# Altium footprint library Connectors.PcbLib: 120 footprints (part 8 of 8)
Each footprint in its own frame and in the unit in brackets; x right, y up, seen from the top. Pads: shape width x height; smd on the part's side, far side on the other; paste and mask are expansions set on the pad; w line width, h text height; cw(c..) or ccw(c..) is an arc to the next point about the centre after c.
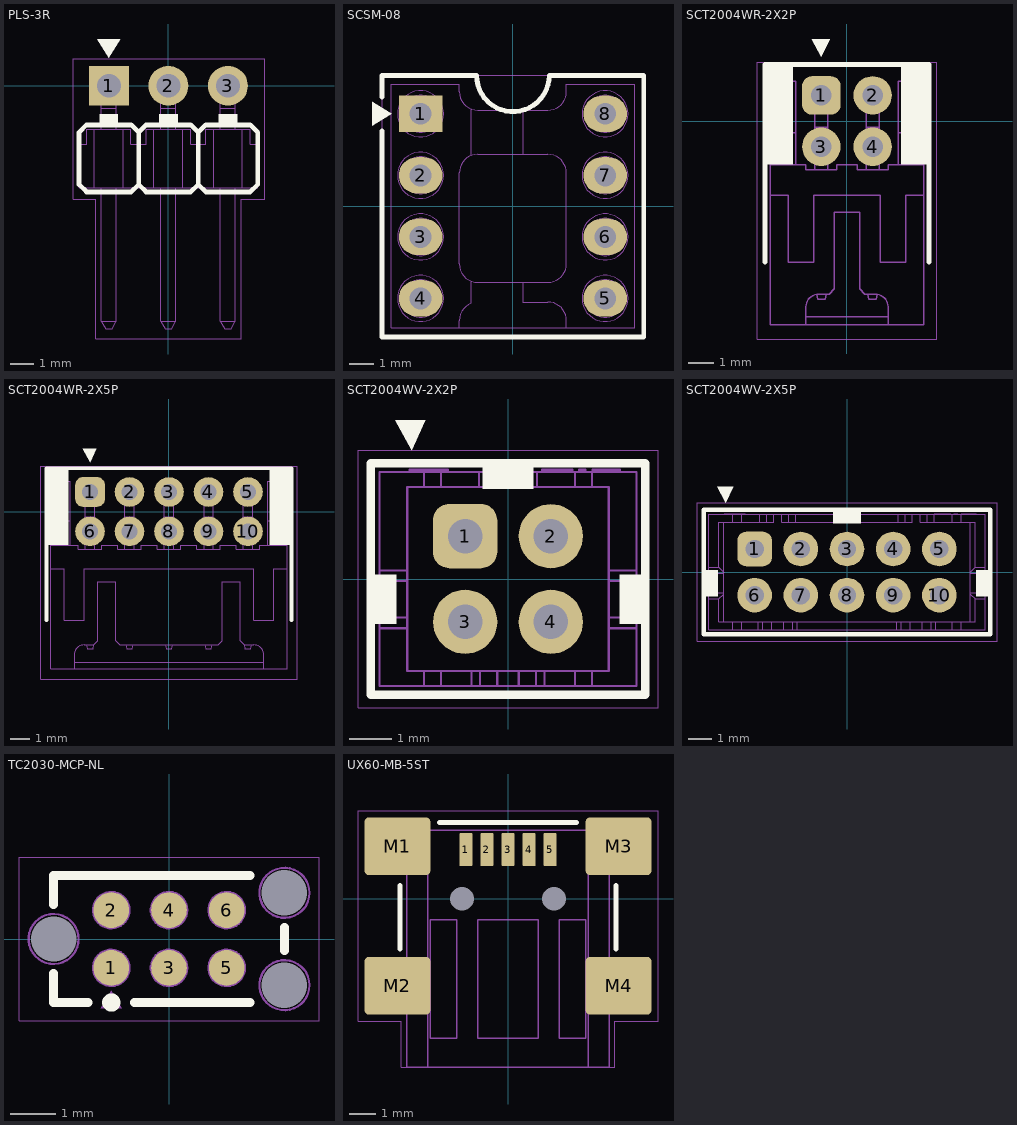
[diagram p7: the footprints below, top view; thin cyan lines are the x and y axes]

## PLS-3R [mm]
pads (3):
  rect 1.7x1.7 hole 1.02: 1(-2.54,0)
  round 1.7 hole 1.02: 2(0,0) 3(2.54,0)
Top Overlay:
  rectangle: 2.14,-1.7 2.94,-1.2
  rectangle: -0.4,-1.7 0.4,-1.2
  rectangle: -2.94,-1.7 -2.14,-1.2
  region: -2.54,1.2 -2.044,1.994 -3.036,1.994
  lines w0.2: -1.27,-4.211 -1.27,-1.989 ; -1.27,-4.211 -0.952,-4.529 0.953,-4.529 1.27,-4.211 ; -1.27,-4.211 -1.587,-4.529 -3.492,-4.529 -3.81,-4.211 -3.81,-1.989 -3.492,-1.671 -1.587,-1.671 -1.27,-1.989 ; -1.27,-1.989 -0.953,-1.671 0.953,-1.671 1.27,-1.989 ; 1.27,-4.211 1.588,-4.529 3.493,-4.529 3.81,-4.211 3.81,-1.989 3.492,-1.671 1.587,-1.671 1.27,-1.989 ; 1.27,-4.211 1.27,-1.989
Top Courtyard:
  lines w0.025: -4.05,-4.85 -4.05,1.15 4.1,1.15 4.1,-4.85 3.1,-4.85 3.1,-10.8 -3.1,-10.8 -3.1,-4.85 -4.05,-4.85
Top Assembly:
  lines w0.05: -2.86,-4.36 -2.86,-10.042 ; -2.86,-1.86 -2.86,-0.96 ; -2.22,-4.36 -2.22,-10.042 ; -2.22,-1.86 -2.22,-0.96 ; -0.32,-4.36 -0.32,-10.042 ; -0.32,-1.86 -0.32,-0.96 ; 0.32,-4.36 0.32,-10.042 ; 0.32,-1.86 0.32,-0.96 ; 2.22,-4.36 2.22,-10.042 ; 2.22,-1.86 2.22,-0.96 ; 2.86,-4.36 2.86,-10.042 ; 2.86,-1.86 2.86,-0.96 ; -3.155,-4.36 -3.81,-4.36 -3.81,-2.5 -3.482,-2.5 -3.482,-1.86 -3.155,-1.86 ; -3.155,-4.36 -1.925,-4.36 ; -3.155,-4.36 -3.155,-1.86 ; -3.155,-1.86 -1.925,-1.86 ; -2.86,-10.042 -2.677,-10.36 -2.403,-10.36 -2.22,-10.042 ; -2.86,-10.042 -2.22,-10.042 ; -2.86,-0.96 -2.22,-0.96 ; -2.86,-0.96 -2.86,0 -2.22,0 -2.22,-0.96 ; -1.925,-4.36 -1.27,-4.36 ; -1.925,-4.36 -1.925,-1.86 ; -1.925,-1.86 -1.597,-1.86 -1.597,-2.5 -1.27,-2.5 -1.27,-4.36 ; -1.27,-4.36 -0.615,-4.36 ; -1.27,-4.36 -1.27,-2.5 -0.943,-2.5 -0.943,-1.86 -0.615,-1.86 ; -0.615,-4.36 0.615,-4.36 ; -0.615,-4.36 -0.615,-1.86 ; -0.615,-1.86 0.615,-1.86 ; -0.32,-10.042 -0.137,-10.36 0.137,-10.36 0.32,-10.042 ; -0.32,-10.042 0.32,-10.042 ; -0.32,-0.96 0.32,-0.96 ; -0.32,-0.96 -0.32,0 0.32,0 0.32,-0.96 ; 0.615,-4.36 1.27,-4.36 ; 0.615,-4.36 0.615,-1.86 ; 0.615,-1.86 0.943,-1.86 0.943,-2.5 1.27,-2.5 ; 1.27,-4.36 1.925,-4.36 ; 1.27,-4.36 1.27,-2.5 ; 1.27,-4.36 1.27,-2.5 ; 1.27,-2.5 1.597,-2.5 1.597,-1.86 1.925,-1.86 ; 1.925,-4.36 3.155,-4.36 ; 1.925,-4.36 1.925,-1.86 ; 1.925,-1.86 3.155,-1.86 ; 2.22,-10.042 2.403,-10.36 2.677,-10.36 2.86,-10.042 ; 2.22,-10.042 2.86,-10.042 ; 2.22,-0.96 2.86,-0.96 ; 2.22,-0.96 2.22,0 2.86,0 2.86,-0.96 ; 3.155,-4.36 3.81,-4.36 3.81,-2.5 3.483,-2.5 3.483,-1.86 3.155,-1.86 ; 3.155,-4.36 3.155,-1.86
  text ".Designator" at -4.511,1.047 h2
3D body "Pin Header 1x3 TH Angle Pitch 2.54mm.stp": height 3.09, standoff -3.2, extent -3.805,-10.796 3.82,0.316

## SCSM-08 [mm] "DIP-8 Panel"
pads (8):
  rect 1.8x1.5 hole 0.9: 1(-3.81,3.81)
  oval 1.8x1.5 hole 0.9: 2(-3.81,1.27) 3(-3.81,-1.27) 4(-3.81,-3.81) 5(3.81,-3.81) 6(3.81,-1.27) 7(3.81,1.27) 8(3.81,3.81)
Top Overlay:
  region: -5.01,3.81 -5.804,4.306 -5.804,3.314
  lines w0.2: -5.4,3.1 -5.4,-5.4 5.4,-5.4 5.4,5.4 1.5,5.4 cw(c0,5.4) -1.5,5.4 -5.4,5.4 -5.4,4.5
Top Courtyard:
  lines w0.025: -5.4,-5.4 -5.4,5.4 5.4,5.4 5.4,-5.4 -5.4,-5.4
Top Assembly:
  lines w0.05: -4.582,-1.27 -4.362,-1.27 ; -3.038,3.81 -3.258,3.81 ; -2.21,-5.029 -2.21,-4.724 cw(c-1.448,-4.724) -1.727,-4.015 -1.727,-3.097 ; -1.727,2.081 -1.727,4.015 ; 0.406,-3.15 0.406,-3.962 1.448,-3.962 cw(c1.448,-4.724) 2.21,-4.724 2.21,-5.029 ; 0.406,2.134 0.406,3.962 ; 3.038,-1.27 3.258,-1.27 ; -4.582,-3.81 ccw(c-3.81,-3.81) -3.038,-3.81 ; -4.582,-3.81 cw(c-3.81,-3.81) -3.038,-3.81 ; -4.582,-3.81 -4.362,-3.81 ; -4.582,1.27 ccw(c-3.81,1.27) -3.038,1.27 ; -4.582,1.27 cw(c-3.81,1.27) -3.038,1.27 ; -4.582,1.27 -4.362,1.27 ; -4.582,3.81 ccw(c-3.81,3.81) -3.038,3.81 ccw(c-3.81,3.81) -4.582,3.81 ; -4.582,3.81 -4.362,3.81 ; -4.362,-3.81 cw(c-3.81,-3.81) -3.258,-3.81 ; -4.362,-3.81 ccw(c-3.81,-3.81) -3.258,-3.81 ; -4.362,-1.27 cw(c-3.81,-1.27) -3.258,-1.27 ; -4.362,-1.27 ccw(c-3.81,-1.27) -3.258,-1.27 ; -4.362,1.27 ccw(c-3.81,1.27) -3.258,1.27 ; -4.362,1.27 cw(c-3.81,1.27) -3.258,1.27 ; -4.362,3.81 ccw(c-3.81,3.81) -3.258,3.81 ; -4.362,3.81 cw(c-3.81,3.81) -3.258,3.81 ; -3.258,-3.81 -3.038,-3.81 ; -3.258,-1.27 -3.038,-1.27 ; -3.258,1.27 -3.038,1.27 ; -3.038,-1.27 ccw(c-3.81,-1.27) -4.582,-1.27 ccw(c-3.81,-1.27) -3.038,-1.27 ; 3.038,-3.81 ccw(c3.81,-3.81) 4.582,-3.81 ; 3.038,-3.81 cw(c3.81,-3.81) 4.582,-3.81 ; 3.038,-3.81 3.258,-3.81 ; 3.038,1.27 ccw(c3.81,1.27) 4.582,1.27 ; 3.038,1.27 cw(c3.81,1.27) 4.582,1.27 ; 3.038,1.27 3.258,1.27 ; 3.038,3.81 cw(c3.81,3.81) 4.582,3.81 ; 3.038,3.81 ccw(c3.81,3.81) 4.582,3.81 ; 3.038,3.81 3.258,3.81 ; 3.258,-3.81 ccw(c3.81,-3.81) 4.362,-3.81 ; 3.258,-3.81 cw(c3.81,-3.81) 4.362,-3.81 ; 3.258,-1.27 cw(c3.81,-1.27) 4.362,-1.27 ; 3.258,-1.27 ccw(c3.81,-1.27) 4.362,-1.27 ; 3.258,1.27 ccw(c3.81,1.27) 4.362,1.27 ; 3.258,1.27 cw(c3.81,1.27) 4.362,1.27 ; 3.258,3.81 cw(c3.81,3.81) 4.362,3.81 ; 3.258,3.81 ccw(c3.81,3.81) 4.362,3.81 ; 4.362,-3.81 4.582,-3.81 ; 4.362,-1.27 4.582,-1.27 ; 4.362,1.27 4.582,1.27 ; 4.362,3.81 4.582,3.81 ; 4.582,-1.27 ccw(c3.81,-1.27) 3.038,-1.27 ccw(c3.81,-1.27) 4.582,-1.27 ; -5.029,-5.029 -5.029,5.029 -2.21,5.029 -2.21,4.724 ccw(c-1.448,4.724) -1.448,3.962 1.448,3.962 ccw(c1.448,4.724) 2.21,4.724 2.21,5.029 5.029,5.029 5.029,-5.029 -5.029,-5.029 ; -4.763,-3.81 ccw(c-3.81,-3.81) -2.857,-3.81 ccw(c-3.81,-3.81) -4.763,-3.81 ; -4.763,-1.27 ccw(c-3.81,-1.27) -2.857,-1.27 ccw(c-3.81,-1.27) -4.763,-1.27 ; -4.763,1.27 ccw(c-3.81,1.27) -2.857,1.27 ccw(c-3.81,1.27) -4.763,1.27 ; -4.763,3.81 ccw(c-3.81,3.81) -2.857,3.81 ccw(c-3.81,3.81) -4.763,3.81 ; -2.21,-2.388 ccw(c-1.448,-2.388) -1.448,-3.15 1.448,-3.15 ccw(c1.448,-2.388) 2.21,-2.388 2.21,1.372 ccw(c1.448,1.372) 1.448,2.134 -1.448,2.134 ccw(c-1.448,1.372) -2.21,1.372 -2.21,-2.388 ; 2.857,-3.81 ccw(c3.81,-3.81) 4.763,-3.81 ccw(c3.81,-3.81) 2.857,-3.81 ; 2.858,-1.27 ccw(c3.81,-1.27) 4.763,-1.27 ccw(c3.81,-1.27) 2.858,-1.27 ; 2.857,1.27 ccw(c3.81,1.27) 4.763,1.27 ccw(c3.81,1.27) 2.857,1.27 ; 2.857,3.81 ccw(c3.81,3.81) 4.763,3.81 ccw(c3.81,3.81) 2.857,3.81
  text ".Designator" at -6.763,-0.679 h3
3D body "SCSM-8.x_t": height 4.5, standoff -2.87, extent -5.029,-5.029 5.029,5.029

## SCT2004WR-2X2P [mm]
height 6.5
pads (4):
  rrect50% 1.5x1.5 hole 0.8 mask+0.05: 1(-1,1)
  round 1.5 hole 0.8 mask+0.05: 2(1,1) 3(-1,-1) 4(1,-1)
Top Overlay:
  region: -2.1,-1.7 -2.1,2.2 -3.2,2.2 -3.2,-1.7
  region: 3.2,-1.7 3.2,2.2 2.1,2.2 2.1,-1.7
  region: -1,2.5 -1.382,3.2 -0.682,3.2
  lines w0.2: -3.2,-5.5 -3.2,2.2 3.2,2.2 3.2,-5.5
Top Courtyard:
  lines w0.025: -3.5,-8.5 3.5,-8.5 3.5,2.3 -3.5,2.3 -3.5,-8.5
Top Assembly:
  lines w0.05: -3,-2.9 -2.3,-2.9 -2.3,-5.5 -1.3,-5.5 -1.3,-2.9 1.3,-2.9 1.3,-5.5 2.3,-5.5 2.3,-2.9 3,-2.9 ; -3,-1.7 -1.6,-1.7 -1.6,-1.9 -0.4,-1.9 -0.4,-1.7 0.4,-1.7 0.4,-1.9 1.6,-1.9 1.6,-1.7 3,-1.7 ; -3,-0.45 -2,-0.45 ; -2,-1.7 -2,1.55 -3,1.55 -3,-7.95 3,-7.95 3,1.55 2,1.55 2,-1.7 ; -1.6,-7.95 -1.6,-7.25 cw(c-1.1,-7.25) -1.1,-6.75 -0.7,-6.75 -0.5,-6.55 -0.5,-3.55 0.5,-3.55 0.5,-6.55 0.7,-6.75 1.1,-6.75 cw(c1.1,-7.25) 1.6,-7.25 1.6,-7.95 ; -1.6,-7.625 1.6,-7.625 ; -1.25,-1.9 -1.25,1.25 -0.75,1.25 -0.75,-1.9 ; -1.25,-0.25 -0.75,-0.25 ; -1.188,-6.758 -1.15,-6.95 -0.85,-6.95 -0.81,-6.75 ; 0.75,-1.9 0.75,1.25 1.25,1.25 1.25,-1.9 ; 0.75,-0.25 1.25,-0.25 ; 0.81,-6.75 0.85,-6.95 1.15,-6.95 1.188,-6.758 ; 2,-0.45 3,-0.45
  text ".Designator" at 5.679,-9.663 h3
3D body "SCT2004WR-2X2P.x_t": height 5.55, standoff -2.95, extent -3,-7.95 3,1.55

## SCT2004WR-2X5P [mm]
height 6.5
pads (10):
  rrect50% 1.5x1.5 hole 0.8 mask+0.05: 1(-4,1)
  round 1.5 hole 0.8 mask+0.05: 2(-2,1) 3(0,1) 4(2,1) 5(4,1) 6(-4,-1) 7(-2,-1) 8(0,-1) 9(2,-1) 10(4,-1)
Top Overlay:
  region: 6.2,-1.7 6.2,2.2 5.1,2.2 5.1,-1.7
  region: -5.1,-1.7 -5.1,2.2 -6.2,2.2 -6.2,-1.7
  region: -4,2.5 -4.382,3.2 -3.682,3.2
  lines w0.2: -6.2,-5.5 -6.2,2.2 6.2,2.2 6.2,-5.5
Top Courtyard:
  lines w0.025: -6.5,-8.5 -6.5,2.3 6.5,2.3 6.5,-8.5 -6.5,-8.5
Top Assembly:
  lines w0.05: -6,-2.9 -5.3,-2.9 -5.3,-5.5 -4.3,-5.5 -4.3,-2.9 4.3,-2.9 4.3,-5.5 5.3,-5.5 5.3,-2.9 6,-2.9 ; -6,-1.7 -4.6,-1.7 -4.6,-1.9 -3.4,-1.9 -3.4,-1.7 -2.6,-1.7 -2.6,-1.9 -1.4,-1.9 -1.4,-1.7 -0.6,-1.7 -0.6,-1.9 0.6,-1.9 0.6,-1.7 1.4,-1.7 1.4,-1.9 2.6,-1.9 2.6,-1.7 3.4,-1.7 3.4,-1.9 4.6,-1.9 4.6,-1.7 6,-1.7 ; -6,-0.45 -5,-0.45 ; -5,-1.7 -5,1.55 -6,1.55 -6,-7.95 6,-7.95 6,1.55 5,1.55 5,-1.7 ; -4.8,-7.95 -4.8,-7.25 cw(c-4.3,-7.25) -4.3,-6.75 -3.8,-6.75 -3.6,-6.55 -3.6,-3.55 -2.7,-3.55 -2.7,-6.55 -2.5,-6.75 2.5,-6.75 2.7,-6.55 2.7,-3.55 3.6,-3.55 3.6,-6.55 3.8,-6.75 4.3,-6.75 cw(c4.3,-7.25) 4.8,-7.25 4.8,-7.95 ; -4.8,-7.625 4.8,-7.625 ; -4.25,-1.9 -4.25,1.25 -3.75,1.25 -3.75,-1.9 ; -4.25,-0.25 -3.75,-0.25 ; -4.19,-6.75 -4.15,-6.95 -3.85,-6.95 -3.81,-6.75 ; -2.25,-1.9 -2.25,1.25 -1.75,1.25 -1.75,-1.9 ; -2.25,-0.25 -1.75,-0.25 ; -2.19,-6.75 -2.15,-6.95 -1.85,-6.95 -1.81,-6.75 ; -0.25,-1.9 -0.25,1.25 0.25,1.25 0.25,-1.9 ; -0.25,-0.25 0.25,-0.25 ; -0.19,-6.75 -0.15,-6.95 0.15,-6.95 0.19,-6.75 ; 1.75,-1.9 1.75,1.25 2.25,1.25 2.25,-1.9 ; 1.75,-0.25 2.25,-0.25 ; 1.81,-6.75 1.85,-6.95 2.15,-6.95 2.19,-6.75 ; 3.75,-1.9 3.75,1.25 4.25,1.25 4.25,-1.9 ; 3.75,-0.25 4.25,-0.25 ; 3.81,-6.75 3.85,-6.95 4.15,-6.95 4.19,-6.75 ; 5,-0.45 6,-0.45
  text ".Designator" at -6.763,-5.179 h3
3D body "SCT2004WR-2X5P.x_t": height 5.55, standoff -2.95, extent -6,-7.95 6,1.55

## SCT2004WV-2X2P [mm]
height 6.5
pads (4):
  rrect50% 1.5x1.5 hole 0.8 mask+0.05: 1(-1,1)
  round 1.5 hole 0.8 mask+0.05: 2(1,1) 3(-1,-1) 4(1,-1)
Top Overlay:
  region: 3.2,-1.05 3.2,0.1 2.6,0.1 2.6,-1.05
  region: -2.6,-1.05 -2.6,0.1 -3.2,0.1 -3.2,-1.05
  rectangle: -0.6,2.1 0.6,2.7
  region: -2.25,3 -2.632,3.7 -1.932,3.7
  lines w0.2: -3.2,-2.7 -3.2,2.7 3.2,2.7 3.2,-2.7 -3.2,-2.7
Top Courtyard:
  lines w0.025: -3.5,-3 -3.5,3 3.5,3 3.5,-3 -3.5,-3
Top Assembly:
  lines w0.05: -3,-1.15 -2.35,-1.15 ; -3,-0.9 -2.35,-0.9 ; -3,-0.05 -2.35,-0.05 ; -3,0.2 -2.35,0.2 ; -2.3,2.5 -2.3,2.55 -1.4,2.55 -1.4,2.5 ; -1.96,-2.5 -1.96,-2.15 ; -1.96,2.15 -1.96,2.5 ; -1.56,-2.5 -1.56,-2.15 ; -1.56,2.15 -1.56,2.5 ; -0.85,-2.5 -0.85,-2.15 ; -0.675,2.15 -0.675,2.5 ; -0.65,-2.5 -0.65,-2.15 ; -0.475,2.15 -0.475,2.5 ; -0.25,-2.5 -0.25,-2.15 ; -0.175,2.5 -0.175,2.15 -2.35,2.15 -2.35,-2.15 2.35,-2.15 2.35,2.15 0.175,2.15 0.175,2.5 ; 0.25,-2.5 0.25,-2.15 ; 0.475,2.15 0.475,2.5 ; 0.65,-2.5 0.65,-2.15 ; 0.675,2.15 0.675,2.5 ; 0.794,2.5 0.794,2.55 0.851,2.55 ; 0.85,-2.5 0.85,-2.15 ; 0.855,2.5 0.855,2.55 1.166,2.55 ; 1.166,2.5 1.166,2.55 ; 1.502,2.5 1.502,2.55 1.166,2.55 ; 1.56,-2.5 1.56,-2.15 ; 1.56,2.15 1.56,2.5 ; 1.655,2.5 1.655,2.55 1.809,2.55 1.809,2.5 ; 1.96,-2.5 1.96,-2.15 ; 1.96,2.15 1.96,2.5 ; 1.973,2.5 1.973,2.55 2.609,2.55 2.609,2.5 ; 2.127,2.5 2.127,2.55 ; 2.35,-1.15 3,-1.15 ; 2.35,-0.9 3,-0.9 ; 2.35,-0.05 3,-0.05 ; 2.35,0.2 3,0.2 ; 2.455,2.5 2.455,2.55 ; -1.3,-1.3 -0.7,-1.3 ; -1.3,-1.3 -1.3,-0.7 ; -1.3,-1.3 -1.15,-1.15 ; -1.3,-0.7 -0.7,-0.7 ; -1.3,-0.7 -1.15,-0.85 ; -1.3,0.7 -0.7,0.7 ; -1.3,0.7 -1.3,1.3 ; -1.3,0.7 -1.15,0.85 ; -1.3,1.3 -0.7,1.3 ; -1.3,1.3 -1.15,1.15 ; -1.15,-1.15 -0.85,-1.15 ; -1.15,-1.15 -1.15,-0.85 ; -1.15,-0.85 -0.85,-0.85 ; -1.15,0.85 -0.85,0.85 ; -1.15,0.85 -1.15,1.15 ; -1.15,1.15 -0.85,1.15 ; -0.85,-1.15 -0.7,-1.3 ; -0.85,-1.15 -0.85,-0.85 ; -0.85,-0.85 -0.7,-0.7 ; -0.85,0.85 -0.7,0.7 ; -0.85,0.85 -0.85,1.15 ; -0.85,1.15 -0.7,1.3 ; -0.7,-1.3 -0.7,-0.7 ; -0.7,0.7 -0.7,1.3 ; 0.7,-1.3 1.3,-1.3 ; 0.7,-1.3 0.7,-0.7 ; 0.7,-1.3 0.85,-1.15 ; 0.7,-0.7 1.3,-0.7 ; 0.7,-0.7 0.85,-0.85 ; 0.7,0.7 1.3,0.7 ; 0.7,0.7 0.7,1.3 ; 0.7,0.7 0.85,0.85 ; 0.7,1.3 1.3,1.3 ; 0.7,1.3 0.85,1.15 ; 0.85,-1.15 0.85,-0.85 ; 0.85,-1.15 1.15,-1.15 ; 0.85,-0.85 1.15,-0.85 ; 0.85,0.85 1.15,0.85 ; 0.85,0.85 0.85,1.15 ; 0.85,1.15 1.15,1.15 ; 1.15,-1.15 1.3,-1.3 ; 1.15,-1.15 1.15,-0.85 ; 1.15,-0.85 1.3,-0.7 ; 1.15,0.85 1.3,0.7 ; 1.15,0.85 1.15,1.15 ; 1.15,1.15 1.3,1.3 ; 1.3,-1.3 1.3,-0.7 ; 1.3,0.7 1.3,1.3 ; -3,-2.5 3,-2.5 3,2.5 -3,2.5 -3,-2.5 ; -1.25,-1.25 -0.75,-1.25 -0.75,-0.75 -1.25,-0.75 -1.25,-1.25 ; -1.25,0.75 -0.75,0.75 -0.75,1.25 -1.25,1.25 -1.25,0.75 ; 0.75,-1.25 1.25,-1.25 1.25,-0.75 0.75,-0.75 0.75,-1.25 ; 0.75,0.75 1.25,0.75 1.25,1.25 0.75,1.25 0.75,0.75
  text ".Designator" at -6.763,3.321 h3
3D body "SCT2004WV-2X2P.x_t": height 6.55, standoff -2.95, extent -3,-2.5 3,2.52

## SCT2004WV-2X5P [mm]
height 6.5
pads (10):
  rrect50% 1.5x1.5 hole 0.8 mask+0.05: 1(-4,1)
  round 1.5 hole 0.8 mask+0.05: 2(-2,1) 3(0,1) 4(2,1) 5(4,1) 6(-4,-1) 7(-2,-1) 8(0,-1) 9(2,-1) 10(4,-1)
Top Overlay:
  rectangle: -0.6,2.1 0.6,2.7
  region: -5.6,-1.05 -5.6,0.1 -6.2,0.1 -6.2,-1.05
  region: 6.2,-1.05 6.2,0.1 5.6,0.1 5.6,-1.05
  region: -5.25,3 -5.632,3.7 -4.932,3.7
  lines w0.2: -6.2,-2.7 6.2,-2.7 6.2,2.7 -6.2,2.7 -6.2,-2.7
Top Courtyard:
  lines w0.025: -6.5,-3 6.5,-3 6.5,3 -6.5,3 -6.5,-3
Top Assembly:
  drawing of 236 lines, arcs and shapes, not listed
  text ".Designator" at -6.763,3.321 h3
3D body "SCT2004WV-2X5P.x_t": height 6.55, standoff -2.95, extent -6,-2.5 6,2.52

## TC2030-MCP-NL [mm]
height 0.6
pads (9):
  round 0.787 smd paste-1 mask+0.05: 1(-1.27,-0.635) 2(-1.27,0.635) 3(0,-0.635) 4(0,0.635) 5(1.27,-0.635) 6(1.27,0.635)
  rect 0x0 hole 1 unplated: Hole0(-2.54,0) Hole1(2.54,1.016) Hole2(2.54,-1.016)
Top Overlay:
  circle w0.2: c-1.27,-1.397 r0.1
  lines w0.2: -2.54,-0.762 -2.54,-1.397 -1.778,-1.397 ; -2.54,0.762 -2.54,1.397 1.778,1.397 ; -0.762,-1.397 1.778,-1.397 ; 2.54,-0.254 2.54,0.254
Top Courtyard:
  lines w0.025: -3.3,-1.8 -3.3,1.8 3.3,1.8 3.3,-1.8 -3.3,-1.8
Top Assembly:
  circle w0.05: c2.54,-1.016 r0.55
  circle w0.05: c2.54,1.016 r0.55
  circle w0.05: c-2.54,0 r0.55
  circle w0.05: c-1.27,0.635 r0.4
  circle w0.05: c0,0.635 r0.4
  circle w0.05: c1.27,0.635 r0.4
  circle w0.05: c1.27,-0.635 r0.4
  circle w0.05: c0,-0.635 r0.4
  circle w0.05: c-1.27,-0.635 r0.4
  region: -1.27,-1.143 -1.499,-1.524 -1.041,-1.524
  text ".Designator" at -4.511,2.087 h2
  text "2" at -1.44,0.378 h0.8
  text "1" at -1.364,-0.892 h0.8
  text "4" at -0.177,0.379 h0.8
  text "3" at -0.167,-0.887 h0.8
  text "6" at 1.101,0.383 h0.8
  text "5" at 1.1,-0.883 h0.8

## UX60-MB-5ST [mm] "MiniUSB Connector"
height 0.6
pads (11):
  rrect15% 0.5x1.25 smd mask+0.08: 1(-1.6,1.875) 2(-0.8,1.875) 3(0,1.875) 4(0.8,1.875) 5(1.6,1.875)
  round 0 hole 0.9 unplated: 14(-1.75,0) 14(1.75,0)
  rrect15% 2.5x2.2 smd mask+0.08: M1(-4.2,2) M2(-4.2,-3.3) M3(4.2,2) M4(4.2,-3.3)
Top Overlay:
  lines w0.2: -4.1,-1.9 -4.1,0.5 ; -2.6,2.9 2.6,2.9 ; 4.1,-1.9 4.1,0.5
Top Courtyard:
  lines w0.025: -5.7,-4.65 -4.05,-4.65 -4.05,-6.4 4.05,-6.4 4.05,-4.65 5.7,-4.65 5.7,3.35 -5.7,3.35 -5.7,-4.65
Top Assembly:
  lines w0.05: -3.85,-3.9 -4.25,-3.9 ; -3.85,-2.7 -4.25,-2.7 ; -3.85,1.4 -4.25,1.4 ; 3.85,-3.9 4.25,-3.9 ; 3.85,-2.7 4.25,-2.7 ; 3.85,1.4 4.25,1.4 ; -4.25,-3.9 -4.25,-2.7 ; -4.25,-3.9 -4.95,-3.9 -4.95,-2.7 -4.25,-2.7 ; -4.25,1.4 -4.25,2.6 ; -4.25,1.4 -4.95,1.4 -4.95,2.6 -4.25,2.6 ; -4.25,2.6 -3.85,2.6 ; -3.85,2.6 -3.05,2.6 ; -3.85,2.6 -3.85,-6.4 -3.05,-6.4 ; -3.05,-6.4 -3.05,2.6 ; -3.05,-6.4 3.05,-6.4 ; -3.05,2.6 3.05,2.6 ; 3.05,-6.4 3.05,2.6 ; 3.05,-6.4 3.85,-6.4 3.85,2.6 ; 3.05,2.6 3.85,2.6 ; 3.85,2.6 4.25,2.6 ; 4.25,-3.9 4.25,-2.7 ; 4.25,-3.9 4.95,-3.9 4.95,-2.7 4.25,-2.7 ; 4.25,1.4 4.25,2.6 ; 4.25,1.4 4.95,1.4 4.95,2.6 4.25,2.6 ; -2.95,-5.3 -2.95,-0.8 -1.95,-0.8 -1.95,-5.3 -2.95,-5.3 ; -1.15,-5.3 1.15,-5.3 1.15,-0.8 -1.15,-0.8 -1.15,-5.3 ; 1.95,-5.3 1.95,-0.8 2.95,-0.8 2.95,-5.3 1.95,-5.3
  text ".Designator" at -3.378,-3.339 h1.5
3D body "UX60-MB-5ST.step": height 4.65, standoff -0.45, extent -4.95,-6.4 4.95,2.6